# Altium schematic symbol library Centralize.SchLib: 1081 symbols (part 18 of 26)
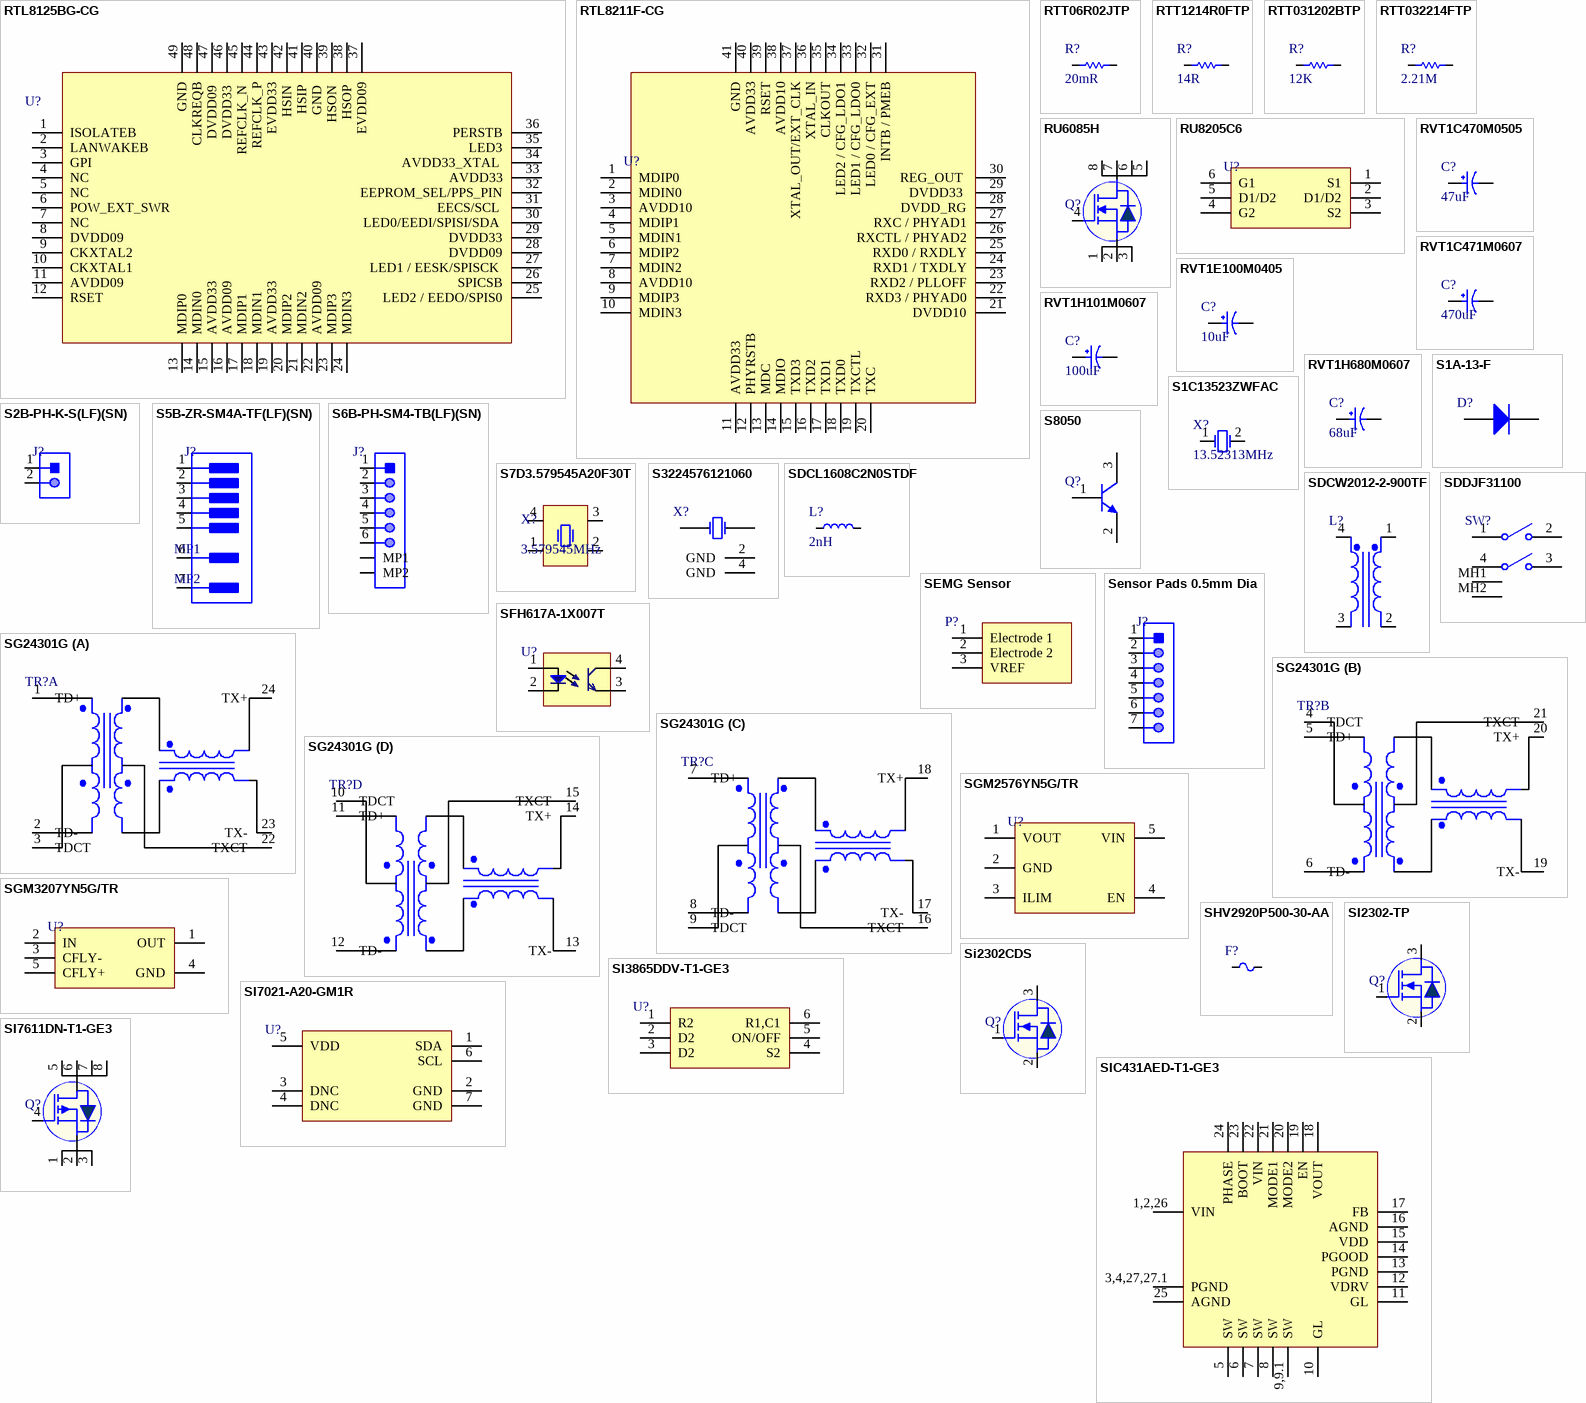
[diagram p64: symbols RTL8125BG-CG to SIC431AED-T1-GE3]

## S1C13523ZWFAC
designator X?, comment 13.52313MHz
13.52313MHz In-line passive crystal oscillator 20pF 60Ω ±20ppm ±30ppm -40℃~+85℃ HC-49S-2P Crystals ROHS; Manufacturer: JYJE; Manufacturer Part Number: S1C13523ZWFAC; Package: HC-49S-2P; LCSC Part Number: C2681243; ComponentLink1Description: LCSC; ComponentLink1URL: https://www.lcsc.com/product-detail/Crystals_JYJE-S1C13523ZWFAC_C2681243.html
footprint HC-49S-2P
pins: 1 OSC1, 2 OSC2

## S2B-PH-K-S(LF)(SN)
designator J?
Conn Shrouded Header (4 Sides) HDR 2 POS 2mm Solder RA Side Entry Thru-Hole Box; Manufacturer: JST; Manufacturer Part Number: S2B-PH-K-S(LF)(SN); Contact Resistance: 20mR; Max Current Rating: 2A; Voltage Rating: 100V; Number of Positions: 2; Gender: Male; Insulation Resistance: 1GR; Item Type: JST Connector; Supplier 1: Rs; RoHS: Yes; Category: Headers and Wire Housings; Stock 1: 39975; Pricing 1: 125=0.02920, 250=0.13800, 1250=0.12800, 5000=0.12200 (GBP); Mounting Technology: Through Hole; Pins: 2; Contact Material: Brass,Tin,Bronze; Contact Plating: Tin,Copper; Housing Color: White; Housing Material: Polyamide; Color: Natural,White; Min Operating Temperature: -25°C; Max Operating Temperature: 85°C; Number of Rows: 1; Current Rating: 2A; Packaging: Bulk; Termination: Solder; Fastening Type: Detent; Number of Contacts: 2; Max Voltage Rating (AC): 100V; Orientation: Right Angle; Series: PH; Contact Type: Male Pin; Number of Poles: 2; Voltage Rating (AC): 100V; Max Voltage Rating (DC): 100V; Working Voltage: 100V; Length: 5.9mm; Width: 4.5mm; Height: 9.4mm; Pitch: 2mm; Depth: 7.6mm; Lead Pitch: 2mm; Contact Mating Length: 0.13inch; Reach SVHC Compliant: No; Lead Free: Lead Free; Flammability Rating: UL94 V-0; ComponentLink1URL: https://datasheet.ciiva.com/11747/0900766b8082f558-11747128.pdf?src-supplier=Rs; ComponentLink1Description: https://datasheet.ciiva.com/11747/0900766b8082f558-11747128.pdf?src-supplier=Rs; ComponentLink2URL: https://datasheet.ciiva.com/712/eph-712447.pdf?src-supplier=Digi-Key; ComponentLink2Description: https://datasheet.ciiva.com/712/eph-712447.pdf?src-supplier=Digi-Key; ComponentLink3URL: https://datasheet.ciiva.com/16484/s2b-ph-k-slfsn-16484405.pdf?src-supplier=Future+Electronics; ComponentLink3Description: https://datasheet.ciiva.com/16484/s2b-ph-k-slfsn-16484405.pdf?src-supplier=Future+Electronics; ComponentLink4URL: https://datasheet.ciiva.com/26894/getdatasheetpartid-641020-26894599.pdf?src-supplier=Verical; ComponentLink4Description: https://datasheet.ciiva.com/26894/getdatasheetpartid-641020-26894599.pdf?src-supplier=Verical; ComponentLink5URL: https://datasheet.ciiva.com/8052/80564-8052207.pdf?src-supplier=Element14; ComponentLink5Description: https://datasheet.ciiva.com/8052/80564-8052207.pdf?src-supplier=Element14; Supplier Part Number 1: 8201494P; LCSC Part Number: C173752
footprint S2B-PH-K-S(LF)(SN)
pins: 1, 2

## S5B-ZR-SM4A-TF(LF)(SN)
designator J?
CONN HEADER SMD R/A 5POS 1.5MM; Manufacturer: JST; Manufacturer Part Number: S5B-ZR-SM4A-TF(LF)(SN); Contact Resistance: 30mR; Max Current Rating: 1A; Voltage Rating: 50V; Number of Positions: 5; Gender: Male; Item Type: Wire to Wire Connector; Supplier 1: Arrow Electronics; RoHS: Yes; Category: Headers and Wire Housings; Stock 1: 66000; Pricing 1: 1000=0.3882, 2000=0.3767, 3000=0.3536, 5000=0.3417, 10000=0.3075, 50000=0.3045 (USD); Mounting Technology: Surface Mount; Color: Natural; Contact Material: Brass,Tin; Contact Plating: Tin,Copper; Housing Color: Beige; Housing Material: Polyamide; Contact Shape: Circular; Contact Finish - Mating: TIN; Insulation Material: Nylon; Insulation Color: Natural; Min Operating Temperature: -25°C; Max Operating Temperature: 85°C; Number of Rows: 1; Packaging: Tape and Reel; Current Rating: 1A; Termination: Solder; Fastening Type: Detent; Max Voltage Rating (AC): 50V; Number of Contacts: 5; Orientation: Right Angle; Connector Type: Header; Series: ZH; Contact Type: Male Pin; Length: 10.5mm; Width: 3.5mm; Height: 7.2mm; Pitch: 1.5mm; Depth: 6.5mm; Lead Free: Lead Free; Flammability Rating: UL94 V-0; Reach SVHC Compliant: Unknown; ComponentLink1URL: https://datasheet.ciiva.com/26924/getdatasheetpartid-640788-26924051.pdf?src-supplier=Verical; ComponentLink1Description: https://datasheet.ciiva.com/26924/getdatasheetpartid-640788-26924051.pdf?src-supplier=Verical; ComponentLink2URL: https://datasheet.ciiva.com/712/ezh-712574.pdf?src-supplier=Digi-Key; ComponentLink2Description: https://datasheet.ciiva.com/712/ezh-712574.pdf?src-supplier=Digi-Key; ComponentLink3URL: https://datasheet.ciiva.com/712/ezh-712575.pdf?src-supplier=Digi-Key; ComponentLink3Description: https://datasheet.ciiva.com/712/ezh-712575.pdf?src-supplier=Digi-Key; ComponentLink4URL: https://datasheet.ciiva.com/712/ezh-712576.pdf?src-supplier=Digi-Key; ComponentLink4Description: https://datasheet.ciiva.com/712/ezh-712576.pdf?src-supplier=Digi-Key; ComponentLink5URL: https://datasheet.ciiva.com/16484/ezr-16484588.pdf?src-supplier=Future+Electronics; ComponentLink5Description: https://datasheet.ciiva.com/16484/ezr-16484588.pdf?src-supplier=Future+Electronics; ComponentLink6URL: https://datasheet.ciiva.com/46409/1718812-46409350.pdf?src-supplier=Element14; ComponentLink6Description: https://datasheet.ciiva.com/46409/1718812-46409350.pdf?src-supplier=Element14; ComponentLink7URL: https://datasheet.ciiva.com/46409/1718812-46409351.pdf?src-supplier=Element14; ComponentLink7Description: https://datasheet.ciiva.com/46409/1718812-46409351.pdf?src-supplier=Element14; Supplier Part Number 1: S5B-ZR-SM4A-TF(LF)(SN); LCSC Part Number: C485355
footprint S5B-ZR-SM4A-TF(LF)(SN)
pins: 1, 2, 3, 4, 5, 6 MP1, 7 MP2

## S6B-PH-SM4-TB(LF)(SN)
designator J?
CONN HEADER SMD R/A 6POS 2MM; Manufacturer: JST; Manufacturer Part Number: S6B-PH-SM4-TB(LF)(SN); Contact Resistance: 20mR; Max Current Rating: 2A; Number of Poles: 6; Voltage Rating (AC): 100V; Insulation Resistance: 1GR; Gender: Male; Item Type: JST Connector; Supplier 1: Rs; RoHS: Yes; Category: Connectors; Stock 1: 8280; Pricing 1: 125=0.16040, 500=0.65000, 2500=0.61200, 5000=0.58600 (GBP); Mounting Technology: Surface Mount; Contact Material: Copper Alloy,Tin,Bronze,Brass; Contact Plating: Tin,Copper; Color: White; Housing Color: Beige; Housing Material: Polyamide; Contact Shape: Square; Insulation Material: Nylon; Insulation Color: Natural; Contact Finish - Mating: TIN; Min Operating Temperature: -25°C; Max Operating Temperature: 85°C; Number of Rows: 1; Packaging: Tape and Reel; Current Rating: 2A; Voltage Rating: 100V; Number of Positions: 6; Termination: Solder; Fastening Type: Detent; Max Voltage Rating (AC): 100V; Number of Contacts: 6; Working Voltage: 100V; Max Voltage Rating (DC): 100V; Orientation: Right Angle; Connector Type: Header; Series: PH; Contact Type: Male Pin; Length: 15.9mm; Width: 5mm; Height: 9.4mm; Lead Pitch: 2mm; Pitch: 2mm; Contact Mating Length: 0.13inch; Depth: 7.6mm; Reach SVHC Compliant: Yes; Lead Free: Lead Free; Flammability Rating: UL94 V-0; ComponentLink1URL: https://datasheet.ciiva.com/11747/0900766b80df0d9d-11747278.pdf?src-supplier=Rs; ComponentLink1Description: https://datasheet.ciiva.com/11747/0900766b80df0d9d-11747278.pdf?src-supplier=Rs; ComponentLink2URL: https://datasheet.ciiva.com/8052/1699381-8052221.pdf?src-supplier=Element14; ComponentLink2Description: https://datasheet.ciiva.com/8052/1699381-8052221.pdf?src-supplier=Element14; ComponentLink3URL: https://datasheet.ciiva.com/712/eph-712622.pdf?src-supplier=Digi-Key; ComponentLink3Description: https://datasheet.ciiva.com/712/eph-712622.pdf?src-supplier=Digi-Key; ComponentLink4URL: https://datasheet.ciiva.com/712/eph-712623.pdf?src-supplier=Digi-Key; ComponentLink4Description: https://datasheet.ciiva.com/712/eph-712623.pdf?src-supplier=Digi-Key; ComponentLink5URL: https://datasheet.ciiva.com/730/eph-730589.pdf?src-supplier=Digi-Key; ComponentLink5Description: https://datasheet.ciiva.com/730/eph-730589.pdf?src-supplier=Digi-Key; ComponentLink6URL: https://datasheet.ciiva.com/16340/jsts6b-ph-sm4-tb-lf-sn-16340154.pdf?src-supplier=Future+Electronics; ComponentLink6Description: https://datasheet.ciiva.com/16340/jsts6b-ph-sm4-tb-lf-sn-16340154.pdf?src-supplier=Future+Electronics; Supplier Part Number 1: 6881369P; LCSC Part Number: C265405
footprint S6B-PH-SM4-TB(LF)(SN)
pins: 1, 2, 3, 4, 5, 6, MP1, MP2

## S7D3.579545A20F30T
designator X?, comment 3.579545MHz
5V~5V ±20ppm CMOS 3.579545MHz SMD7050-4P Oscillators ROHS; Manufacturer: Shenzhen SCTF Elec; Manufacturer Part Number: S7D3.579545A20F30T; Item Type: Crystal; Package: SMD7050-4P; LCSC Part Number: C386914; ComponentLink1Description: LCSC; ComponentLink1URL: https://www.lcsc.com/product-detail/Oscillators_Shenzhen-SCTF-Elec-S7D3-579545A20F30T_C386914.html
footprint SMD7050-4P
pins: 1 ENABLE CONTROL, 2 GND, 3 OUT PUT , 4 VDD

## S8050
designator Q?
Trans Gp Bjt NPN 25V 1.5A 300MW 3-PIN SOT-23 T/r; Manufacturer: Comchip; Manufacturer Part Number: SS8050-G; Collector Emitter Voltage (VCEO): 400mV; Transition Frequency: 100MHz; Supplier 1: Arrow Electronics; RoHS: Yes; Stock 1: 2514; Pricing 1: 1=0.26480, 10=0.19960, 25=0.19760, 50=0.19590, 100=0.09990, 250=0.09890, 500=0.07670, 1000=0.05180 (USD); Mount: Surface Mount; Case/Package: TO-236-3; Packaging: Tape and Reel; Max Power Dissipation: 300mW; Max Collector Current: 1.5A; Collector Emitter Breakdown Voltage: 25V; Max Breakdown Voltage: 25V; ComponentLink1URL: http://www.comchiptech.com/admin/files/product/SS8050-G RevA181526.pdf?src-supplier=Digi-Key; ComponentLink1Description: http://www.comchiptech.com/admin/files/product/SS8050-G RevA181526.pdf?src-supplier=Digi-Key; ComponentLink2URL: http://www.comchiptech.com/cms/UserFiles/SS8050-G%20RevA181526.pdf?src-supplier=Digi-Key; ComponentLink2Description: http://www.comchiptech.com/cms/UserFiles/SS8050-G%20RevA181526.pdf?src-supplier=Digi-Key; Supplier Part Number 1: SS8050-G; LCSC Part Number: C105433
footprint SOT-23 (TRANS NPN 40V 0.6A SOT23)
pins: 1 B, 2 E, 3 C

## S3224576121060
designator X?
24.576MHz SMD Crystal Resonator 12pF 60Ω ±10ppm -40℃~+85℃ SMD3225-4P Crystals ROHS; Manufacturer: JGHC; Manufacturer Part Number: S3224576121060; Footprint: Custom; ComponentLink1Description: LCSC; ComponentLink1URL: https://lcsc.com/product-detail/Crystals_JGHC-S3224576121060_C390772.html; Value: 24.576MHz; LCSC Part Number: C390772
footprint S3224576121060_ (24.576MHz SMD Crystal Resonator 12pF 60O ±10ppm -40?~+85? SMD3225-4P Crystals ROHS)
pins: 1 OSC1, 2 GND, 3 OSC2, 4 GND

## SDCL1608C2N0STDF
designator L?, comment 2nH
2nH ±0.3nH 0603 Inductors; Manufacturer: Sunlord; Manufacturer Part Number: SDCL1608C2N0STDF; Footprint: 0603; ComponentLink1Description: LCSC; ComponentLink1URL: https://lcsc.com/product-detail/Inductors-SMD_Sunlord-SDCL1608C2N0STDF_C370234.html; Value: 2nH; LCSC Part Number: C370234
footprint IND-0603 (1608 Metric) (0.063" L x 0.032" W (1.60mm x 0.80mm))
pins: 1, 2

## SDCW2012-2-900TF
designator L?
90Ω@100MHz -40℃~+85℃ 350mΩ 50V 2 330mA 125V 0805 Common Mode Filters ROHS; Manufacturer: Sunlord; Manufacturer Part Number: SDCW2012-2-900TF; Supplier 1: Digi-Key; RoHS: No; Category: Common Mode Chokes; Supplier Part Number 1: 3442-SDCW2012-2-900TFCT-ND; ComponentLink1Description: LCSC; ComponentLink1URL: https://www.lcsc.com/product-detail/Common-Mode-Filters_Sunlord-SDCW2012-2-900TF_C54888.html; LCSC Part Number: C54888
footprint SDCW2012-2-900TF_
pins: 1, 2, 3, 4

## SDDJF31100
designator SW?
Black Concave edge bending Double pole single throw O - Solder Lug(Straight foot) 16A 250V Plugin Rocker Switches ROHS; Manufacturer: ALPSALPINE; Manufacturer Part Number: SDDJF31100; Item Type: Switch; Package: Plugin; LCSC Part Number: C380204; ComponentLink1Description: LCSC; ComponentLink1URL: https://www.lcsc.com/product-detail/Rocker-Switches_ALPSALPINE-SDDJF31100_C380204.html
footprint SDDJF31100
pins: 1, 2, 3, 4, MH1, MH2

## SEMG Sensor
designator P?
Sensor Connecting Pads
footprint sEMG-sensor
pins: 1 Electrode 1, 2 Electrode 2, 3 VREF

## Sensor Pads 0.5mm Dia
designator J?
Wire Connecting Pad; Manufacturer Part Number: Sensor Pads; Item Type: SMD Pads
footprint Sensor-Pads 0.5mm Dia
pins: 1, 2, 3, 4, 5, 6, 7

## SFH617A-1X007T
designator U?
OPTOISOLATOR 5.3KV TRANS 4SMD; Manufacturer: Vishay Semiconductors; Manufacturer Part Number: SFH617A-1X007T; Max Power Dissipation: 150mW; Reverse Breakdown Voltage: 6V; Forward Voltage: 1.35V; Forward Current: 60mA; Number of Channels: 1; Collector Emitter Voltage (VCEO): 70V; Output Current per Channel: 50mA; Collector Emitter Saturation Voltage: 400mV; Max Collector Current: 100mA; Power Dissipation: 400mW; Current Transfer Ratio: 80%; Input Type: DC; Supplier 1: Digi-Key; RoHS: Yes; Category: Optocouplers; Stock 1: 899; Pricing 1: 1=1.12000, 10=0.73200, 100=0.47950 (USD); Mount: Surface Mount; Case/Package: SMD/SMT; Number of Pins: 4; Min Operating Temperature: -55°C; Max Operating Temperature: 110°C; Packaging: Tape and Reel; Package Quantity: 1000; Max Output Voltage: 70V; Max Input Current: 60mA; Number of Elements: 1; Collector-emitter Voltage-Max: 400mV; Radiation Hardening: No; RoHS Compliant: Yes; ComponentLink1URL: https://datasheet.ciiva.com/12239/sfh617a-12239406.pdf?src-supplier=Mouser; ComponentLink1Description: https://datasheet.ciiva.com/12239/sfh617a-12239406.pdf?src-supplier=Mouser; ComponentLink2URL: https://datasheet.ciiva.com/18616/options-18616574.pdf?src-supplier=Digi-Key; ComponentLink2Description: https://datasheet.ciiva.com/18616/options-18616574.pdf?src-supplier=Digi-Key; Supplier Part Number 1: 751-SFH617A-1X007TCT-ND; Item Type: OPTOISOLATOR
footprint 4-SMD  (SFH617A-1X007T)
pins: 1 An, 2 Ca, 3 E, 4 C

## SG24301G
designator TR?
SMD RJ45 Transformer ROHS; Manufacturer: JWD; Manufacturer Part Number: SG24301G; Package: SMD; ComponentLink1Description: LCSC; ComponentLink1URL: https://www.lcsc.com/product-detail/RJ45-Transformer_JWD-SG24301G_C722253.html; LCSC Part Number: C722253; Item Type: Transformer
footprint SG24301G
part A pins: 1 TD+, 2 TD-, 3 TDCT, 22 TXCT, 23 TX-, 24 TX+
part B pins: 4 TDCT, 5 TD+, 6 TD-, 19 TX-, 20 TX+, 21 TXCT
part C pins: 7 TD+, 8 TD-, 9 TDCT, 16 TXCT, 17 TX-, 18 TX+
part D pins: 10 TDCT, 11 TD+, 12 TD-, 13 TX-, 14 TX+, 15 TXCT

## SGM2576YN5G/TR
designator U?
SOT-23-5 Power Distribution Switches ROHS; Manufacturer: SGMICRO; Manufacturer Part Number: SGM2576YN5G/TR; Item Type: IC; ComponentLink1Description: LCSC; ComponentLink1URL: https://lcsc.com/product-detail/Power-Distribution-Switches_SGMICRO-SGM2576YN5G-TR_C699888.html; Package: SOT-23-5; LCSC Part Number: C699888
footprint SOT-23-5
pins: 1 VOUT, 2 GND, 3 ILIM, 4 EN, 5 VIN

## SGM3207YN5G/TR
designator U?
NO Charge pump 1 -5.5V~-1.4V 1.4V~5.5V 60mA 19kHz SOT-23-5 DC-DC Converters ROHS; Manufacturer: SG Micro; Manufacturer Part Number: SGM3207YN5G/TR; Item Type: IC; Supplier 1: Avnet; RoHS: No; Category: Uncategorized; Pricing 1: 3000=0.38750, 6000=0.36250, 12000=0.33750, 18000=0.32500, 24000=0.31250, 30000=0.31250, 300000=0.30500 (USD); LCSC Part Number: C80403; Supplier Part Number 1: SGM3207YN5G/TR
footprint SOT-23-5
pins: 1 OUT, 2 IN, 3 CFLY-, 4 GND, 5 CFLY+

## SHV2920P500-30-AA
designator F?
30V 5A 5A 2920 Resettable Fuses ROHS; Manufacturer: PTTC(Polytronics Tech); Manufacturer Part Number: SHV2920P500-30-AA; Item Type: Fuse; ComponentLink1Description: LCSC; ComponentLink1URL: https://www.lcsc.com/product-detail/Resettable-Fuses_PTTC-Polytronics-Tech-SHV2920P500-30-AA_C495350.html; Package: 2920; LCSC Part Number: C495350
footprint Fuse-2920
pins: 1, 2

## SI2302-TP
designator Q?
SI2302 Series 20 3 A N-Ch Enhancement Mode Field Effect Transistor - SOT-23-3; Manufacturer: MCC; Manufacturer Part Number: SI2302-TP; Rds On Max: 72mR; Input Capacitance: 237pF; Drain to Source Voltage (Vdss): 20V; Continuous Drain Current (ID): 3A; Max Power Dissipation: 1.25W; Drain to Source Resistance: 110mR; Number of Elements: 1; Gate to Source Voltage (Vgs): 8V; Polarity: N-CHANNEL; Supplier 1: Digi-Key; RoHS: Yes; Category: Transistors; Stock 1: 13753; Pricing 1: 1=0.50000, 10=0.40300, 100=0.27460, 500=0.20592, 1000=0.15444 (USD); Mount: Surface Mount; Case/Package: SOT-23; Number of Pins: 3; Min Operating Temperature: -55°C; Max Operating Temperature: 150°C; Packaging: Tape and Reel; Package Quantity: 3000; Drain to Source Breakdown Voltage: 20V; Power Dissipation: 1.25W; Lead Free: Lead Free; RoHS Compliant: Yes; ComponentLink1URL: https://datasheet.ciiva.com/935/si2302sot-23-935107.pdf?src-supplier=Digi-Key; ComponentLink1Description: https://datasheet.ciiva.com/935/si2302sot-23-935107.pdf?src-supplier=Digi-Key; ComponentLink2URL: https://datasheet.ciiva.com/935/si2302sot-23-935109.pdf?src-supplier=Digi-Key; ComponentLink2Description: https://datasheet.ciiva.com/935/si2302sot-23-935109.pdf?src-supplier=Digi-Key; ComponentLink3URL: https://datasheet.ciiva.com/935/si2302sot-23-935108.pdf?src-supplier=Digi-Key; ComponentLink3Description: https://datasheet.ciiva.com/935/si2302sot-23-935108.pdf?src-supplier=Digi-Key; Supplier Part Number 1: SI2302-TPMSCT-ND; LCSC Part Number: C77977
footprint SOT-23 (TRANS NPN 40V 0.6A SOT23)
pins: 1 G, 2 S, 3 D

## Si2302CDS
designator Q?
N-CHANNEL 20-V (D-S) MOSFET; Manufacturer: TECH PUBLIC; Manufacturer Part Number: SI2302CDS; ComponentLink1Description: LCSC; ComponentLink1URL: https://www.lcsc.com/product-detail/MOSFETs_TECH-PUBLIC-SI2302CDS_C5310968.html; Package: SOT-23; LCSC Part Number: C5310968; Item Type: Mosfet
footprint Sot-23 (TRANS NPN 40V 0.6A SOT23)
pins: 1 G, 2 S, 3 D

## SI3865DDV-T1-GE3
designator U?
IC PWR SWITCH P-CHAN 1:1 6TSOP; Manufacturer: Vishay; Manufacturer Part Number: SI3865DDV-T1-GE3; Output Current: 1A; Number of Outputs: 1; Max Power Dissipation: 830mW; Max Supply Voltage: 12V; Min Supply Voltage: 1.5V; Interface: On/Off; Max Output Current: 2.8A; On-State Resistance: 165mR; Output Configuration: High Side; On-state Resistance-Max: 54mR; Supplier 1: Digi-Key; Stock 1: 54870; Pricing 1: 1=0.58, 10=0.494, 25=0.462, 100=0.3432, 500=0.26796, 1000=0.2178 (USD); Mount: Surface Mount; Case/Package: TSOP; Number of Pins: 6; Weight: 0.000705oz; Min Operating Temperature: -55°C; Max Operating Temperature: 150°C; Packaging: Tape and Reel; Package Quantity: 3000; Power Dissipation: 830mW; Current Rating: 2.8A; Series: TrenchFET®; Rated Current-Max: 2.8A; Length: 3.1mm; Width: 1.7mm; Height: 1mm; Radiation Hardening: No; REACH SVHC: No SVHC; Lead Free: Lead Free; RoHS Compliant: Yes; ComponentLink1URL: http://www.mouser.com/ds/2/427/si3865ddv-256526.pdf?src-supplier=Mouser; ComponentLink1Description: http://www.mouser.com/ds/2/427/si3865ddv-256526.pdf?src-supplier=Mouser; ComponentLink2URL: http://www.vishay.com/docs/67998/si3865ddv.pdf?src-supplier=Avnet; ComponentLink2Description: http://www.vishay.com/docs/67998/si3865ddv.pdf?src-supplier=Avnet; ComponentLink3URL: https://www.verical.com/server-webapp/html/getDatasheet?partID=710254&src-supplier=Verical; ComponentLink3Description: https://www.verical.com/server-webapp/html/getDatasheet?partID=710254&src-supplier=Verical; ComponentLink4URL: https://media.digikey.com/pdf/Data%20Sheets/Vishay%20Siliconix%20PDFs/Si3865DDV.pdf?src-supplier=Digi-Key; ComponentLink4Description: https://media.digikey.com/pdf/Data%20Sheets/Vishay%20Siliconix%20PDFs/Si3865DDV.pdf?src-supplier=Digi-Key; Supplier Part Number 1: SI3865DDV-T1-GE3CT-ND; LCSC Part Number: C141534; Item Type: IC
footprint 6-TSOP_
pins: 1 R2, 2 D2, 3 D2, 4 S2, 5 ON/OFF, 6 R1,C1

## SI7021-A20-GM1R
designator U?
SENS HUMID/TEMP 3.6V I2C 2% 6DFN; Manufacturer: Silicon Labs; Manufacturer Part Number: SI7021-A20-GM1R; Response Time: 18s; Accuracy: 3%; Sensor Type: Temperature; Output Type: I2C,Digital; Supplier 1: Digi-Key; Stock 1: 8770; Pricing 1: 1=3.37, 25=3.2436, 100=3.2313 (USD); Mount: Surface Mount; Min Operating Temperature: -40°C; Max Operating Temperature: 85°C; ComponentLink1URL: https://www.silabs.com/Support%20Documents/TechnicalDocs/Si7021-A20.pdf?src-supplier=Avnet; ComponentLink1Description: https://www.silabs.com/Support%20Documents/TechnicalDocs/Si7021-A20.pdf?src-supplier=Avnet; ComponentLink2URL: https://www.silabs.com/documents/public/data-sheets/Si7021-A20.pdf?src-supplier=Newark; ComponentLink2Description: https://www.silabs.com/documents/public/data-sheets/Si7021-A20.pdf?src-supplier=Newark; ComponentLink3URL: https://www.silabs.com/Support%20Documents%2fTechnicalDocs%2fSi7021-A20.pdf?src-supplier=Digi-Key; ComponentLink3Description: https://www.silabs.com/Support%20Documents%2fTechnicalDocs%2fSi7021-A20.pdf?src-supplier=Digi-Key; ComponentLink4URL: https://www.silabs.com/Support%20Documents/TechnicalDocs/Si7021-A20.pdf?src-supplier=Avnet+Asia; ComponentLink4Description: https://www.silabs.com/Support%20Documents/TechnicalDocs/Si7021-A20.pdf?src-supplier=Avnet+Asia; ComponentLink5URL: https://www.silabs.com/documents/public/data-sheets/Si7021-A20.pdf?src-supplier=Digi-Key; ComponentLink5Description: https://www.silabs.com/documents/public/data-sheets/Si7021-A20.pdf?src-supplier=Digi-Key; ComponentLink6URL: https://www.silabs.com/documents/public/data-sheets/Si7021-A20.pdf?src-supplier=Farnell; ComponentLink6Description: https://www.silabs.com/documents/public/data-sheets/Si7021-A20.pdf?src-supplier=Farnell; Supplier Part Number 1: 336-4380-1-ND; LCSC Part Number: C132603
footprint 6-DFN (3x3)
pins: 1 SDA, 2 GND, 3 DNC, 4 DNC, 5 VDD, 6 SCL, 7 GND

## SI7611DN-T1-GE3
designator Q?
MOSFET P-CH 40V 18A PPAK1212-8; Manufacturer: Vishay Siliconix; Manufacturer Part Number: SI7611DN-T1-GE3; Rds On Max: 25mR; Input Capacitance: 1.98nF; Nominal Vgs: -3V; Rise Time: 11ns; Drain to Source Voltage (Vdss): -40V; Continuous Drain Current (ID): 9.3A; Max Power Dissipation: 39W; Gate to Source Voltage (Vgs): 20V; Fall Time: 9ns; Turn-Off Delay Time: 30ns; Number of Elements: 1; Power Dissipation: 3.7W; Turn-On Delay Time: 10ns; Polarity: P-CHANNEL; Supplier 1: Avnet; RoHS: Yes; Category: MOSFETs; Pricing 1: 3000=0.96116 (USD); Mount: Surface Mount; Number of Pins: 8; Min Operating Temperature: -50°C; Max Operating Temperature: 150°C; Package Quantity: 3000; Packaging: Tape and Reel; Drain to Source Resistance: 25mR; Threshold Voltage: -3V; Drain to Source Breakdown Voltage: -40V; Number of Channels: 1; On-State Resistance: 25mR; Series: TrenchFET®; Drain-source On Resistance-Max: 25mR; Length: 3.05mm; Width: 3.05mm; Height: 1.04mm; Radiation Hardening: No; Lead Free: Lead Free; RoHS Compliant: Yes; ComponentLink1URL: https://datasheet.ciiva.com/16217/si7611dn-16217425.pdf?src-supplier=Future+Electronics; ComponentLink1Description: https://datasheet.ciiva.com/16217/si7611dn-16217425.pdf?src-supplier=Future+Electronics; ComponentLink2URL: https://datasheet.ciiva.com/22652/1719651-22652413.pdf?src-supplier=Element14; ComponentLink2Description: https://datasheet.ciiva.com/22652/1719651-22652413.pdf?src-supplier=Element14; ComponentLink3URL: https://datasheet.ciiva.com/4441/si7611dn-244617-4441134.pdf?src-supplier=Mouser; ComponentLink3Description: https://datasheet.ciiva.com/4441/si7611dn-244617-4441134.pdf?src-supplier=Mouser; ComponentLink4URL: https://datasheet.ciiva.com/933/si7611dn-933572.pdf?src-supplier=Digi-Key; ComponentLink4Description: https://datasheet.ciiva.com/933/si7611dn-933572.pdf?src-supplier=Digi-Key; ComponentLink5URL: https://datasheet.ciiva.com/933/si7611dn-933573.pdf?src-supplier=Digi-Key; ComponentLink5Description: https://datasheet.ciiva.com/933/si7611dn-933573.pdf?src-supplier=Digi-Key; ComponentLink6URL: https://datasheet.ciiva.com/933/si7611dn-933574.pdf?src-supplier=Digi-Key; ComponentLink6Description: https://datasheet.ciiva.com/933/si7611dn-933574.pdf?src-supplier=Digi-Key; ComponentLink7URL: https://datasheet.ciiva.com/11159/si7611dn-11159816.pdf?src-supplier=Avnet; ComponentLink7Description: https://datasheet.ciiva.com/11159/si7611dn-11159816.pdf?src-supplier=Avnet; ComponentLink8URL: https://datasheet.ciiva.com/22671/si7611dn-22671641.pdf?src-supplier=Element14; ComponentLink8Description: https://datasheet.ciiva.com/22671/si7611dn-22671641.pdf?src-supplier=Element14; Supplier Part Number 1: SI7611DN-T1-GE3; LCSC Part Number: C506599; Item Type: Mosfet
footprint PowerPAK® 1212-8
pins: 1 S, 2 S, 3 S, 4 G, 5 D, 6 D, 7 D, 8 D

## SIC431AED-T1-GE3
designator ?
Conv DC-DC 4.5V to 24V Synchronous Step Down Single-Out 0.6V 24A 24-Pin PowerPAK MLP EP T/R; Manufacturer: Vishay; Manufacturer Part Number: SIC431AED-T1-GE3; Output Type: Adjustable; Output Configuration: Positive; Number of Outputs: 1; Min Input Voltage: 3V; Min Output Voltage: 600mV; Max Output Voltage: 20V; Switching Frequency: 1MHz; Synchronous Rectifier: Yes; Item Type: Converter; Supplier 1: Mouser; RoHS: No; Category: Voltage Regulators - Switching; Stock 1: 56372; Pricing 1: 1=3.29000, 10=2.96000, 50=2.75000, 100=2.43000, 1000=1.99000, 10000=1.99000 (USD); Mount: Surface Mount; Number of Pins: 24; Min Operating Temperature: -40°C; Max Operating Temperature: 125°C; Packaging: Cut Tape; Max Input Voltage: 24V; Output Current: 24A; RoHS Compliant: No; ComponentLink1URL: http://www.farnell.com/datasheets/2687455.pdf?src-supplier=Farnell; ComponentLink1Description: http://www.farnell.com/datasheets/2687455.pdf?src-supplier=Farnell; ComponentLink2URL: http://www.vishay.com/docs/74589/sic431.pdf?src-supplier=Digi-Key; ComponentLink2Description: http://www.vishay.com/docs/74589/sic431.pdf?src-supplier=Digi-Key; ComponentLink3URL: http://www.vishay.com/docs/48283/_ms7327_1709.pdf?src-supplier=Digi-Key; ComponentLink3Description: http://www.vishay.com/docs/48283/_ms7327_1709.pdf?src-supplier=Digi-Key; ComponentLink4URL: http://www.farnell.com/datasheets/2687455.pdf?src-supplier=Newark; ComponentLink4Description: http://www.farnell.com/datasheets/2687455.pdf?src-supplier=Newark; ComponentLink5URL: http://www.farnell.com/datasheets/2687455.pdf?src-supplier=Element14; ComponentLink5Description: http://www.farnell.com/datasheets/2687455.pdf?src-supplier=Element14; ComponentLink6Description: LCSC; ComponentLink6URL: https://www.lcsc.com/product-detail/DC-DC-Converters_Vishay-Intertech-SIC431AED-T1-GE3_C2071422.html; LCSC Part Number: C2071422
footprint MLP44-24L(4x4)_
pins: 1,2,26 VIN, 3,4,27,27.1 PGND, 5 SW, 6 SW, 7 SW, 8 SW, 9,9.1 SW, 10 GL, 11 GL, 12 VDRV, 13 PGND, 14 PGOOD, 15 VDD, 16 AGND, 17 FB, 18 VOUT, 19 EN, 20 MODE2, 21 MODE1, 22 VIN, 23 BOOT, 24 PHASE, 25 AGND

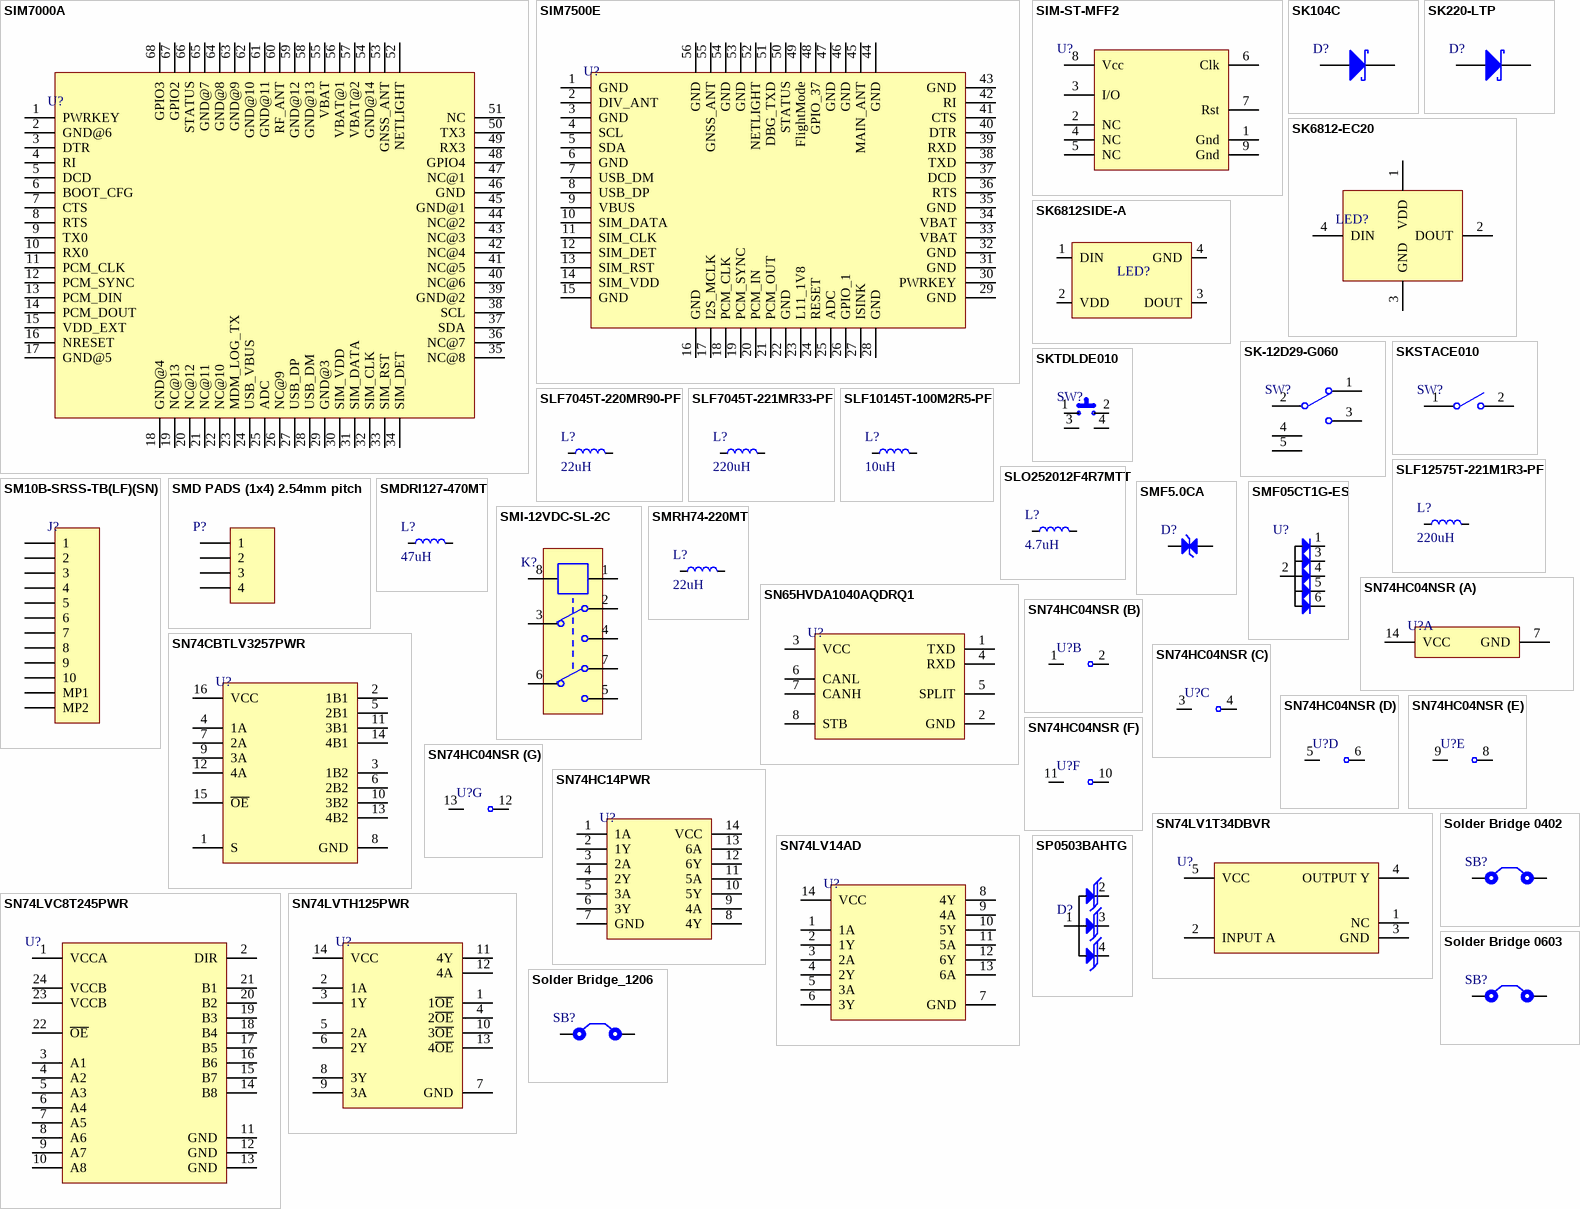
[diagram p37: symbols SIM7000A to SP0503BAHTG]

## SIM7000A
designator U?
eMTC CAT-M1 Module 700MHz/1700MHz/1900MHz 3.8V LCC; Manufacturer: Simcom; Manufacturer Part Number: SIM7000A; Supplier 1: Avnet; RoHS: No; Category: Uncategorized; Pricing 1: 50=18.60000, 100=17.40000, 200=16.20000, 300=15.60000, 400=15.00000, 500=15.00000, 5000=14.64000 (USD); Supplier Part Number 1: SIM7000A; ComponentLink1Description: LCSC; ComponentLink1URL: https://www.lcsc.com/product-detail/2G-3G-4G-5G-Modules_SIMCom-Wireless-Solutions-SIM7000A_C126271.html; LCSC Part Number: C126271; Item Type: Module
footprint SIM7000A
pins: 1 PWRKEY, 2 GND@6, 3 DTR, 4 RI, 5 DCD, 6 BOOT_CFG, 7 CTS, 8 RTS, 9 TX0, 10 RX0, 11 PCM_CLK, 12 PCM_SYNC, 13 PCM_DIN, 14 PCM_DOUT, 15 VDD_EXT, 16 NRESET, 17 GND@5, 18 GND@4, 19 NC@13, 20 NC@12, 21 NC@11, 22 NC@10, 23 MDM_LOG_TX, 24 USB_VBUS, 25 ADC, 26 NC@9, 27 USB_DP, 28 USB_DM, 29 GND@3, 30 SIM_VDD, 31 SIM_DATA, 32 SIM_CLK, 33 SIM_RST, 34 SIM_DET, 35 NC@8, 36 NC@7, 37 SDA, 38 SCL, 39 GND@2, 40 NC@6, 41 NC@5, 42 NC@4, 43 NC@3, 44 NC@2, 45 GND@1, 46 GND, 47 NC@1, 48 GPIO4, 49 RX3, 50 TX3, 51 NC, 52 NETLIGHT, 53 GNSS_ANT, 54 GND@14, 55 VBAT, 56 VBAT@1, 57 VBAT@2, 58 GND@13, 59 GND@12, 60 RF_ANT, 61 GND@11, 62 GND@10, 63 GND@9, 64 GND@8, 65 GND@7, 66 STATUS, 67 GPIO2, 68 GPIO3

## SIM7500E
designator U?
SMD,30x30mm 2G/3G/4G/5G Modules ROHS; Manufacturer: SIMCom; Manufacturer Part Number: SIM7500E; Item Type: IC; Package: SMD,30x30mm; LCSC Part Number: C126259; ComponentLink1Description: LCSC; ComponentLink1URL: https://www.lcsc.com/product-detail/2G-3G-4G-5G-Modules_SIMCom-Wireless-Solutions-SIM7500E_C126259.html
footprint SIM7500E
pins: 1 GND, 2 DIV_ANT, 3 GND, 4 SCL, 5 SDA, 6 GND, 7 USB_DM, 8 USB_DP, 9 VBUS, 10 SIM_DATA, 11 SIM_CLK, 12 SIM_DET, 13 SIM_RST, 14 SIM_VDD, 15 GND, 16 GND, 17 I2S_MCLK, 18 PCM_CLK, 19 PCM_SYNC, 20 PCM_IN, 21 PCM_OUT, 22 GND, 23 L11_1V8, 24 RESET, 25 ADC, 26 GPIO_1, 27 ISINK, 28 GND, 29 GND, 30 PWRKEY, 31 GND, 32 GND, 33 VBAT, 34 VBAT, 35 GND, 36 RTS, 37 DCD, 38 TXD, 39 RXD, 40 DTR, 41 CTS, 42 RI, 43 GND, 44 GND, 45 MAIN_ANT, 46 GND, 47 GND, 48 GPIO_37, 49 FlightMode, 50 STATUS, 51 DBG_TXD, 52 NETLIGHT, 53 GND, 54 GND, 55 GNSS_ANT, 56 GND

## SIM-ST-MFF2
designator U?
GLOBAL IOT EMBEDDED SIM CHIP; Manufacturer: Hologram; Manufacturer Part Number: SIM-ST-MFF2; Item Type: IC; Supplier 1: Digi-Key; Stock 1: 0; Pricing 1: 1=6.3, 100=5.985 (USD); ComponentLink1URL: https://media.digikey.com/pdf/Data%20Sheets/Hologram%20PDFs/SIM_DS_170107_v2.pdf?src-supplier=Digi-Key; ComponentLink1Description: https://media.digikey.com/pdf/Data%20Sheets/Hologram%20PDFs/SIM_DS_170107_v2.pdf?src-supplier=Digi-Key; Supplier Part Number 1: 1887-1002-1-ND
footprint QNF8 (6 x 5mm)
pins: 1 Gnd, 2 NC, 3 I/O, 4 NC, 5 NC, 6 Clk, 7 Rst, 8 Vcc, 9 Gnd

## SK104C
designator D?
40V 650mV@10A 10A SMC(DO-214AB) Schottky Barrier Diodes (SBD) ROHS; Manufacturer: MDD; Manufacturer Part Number: SK104C; Item Type: Diode; Package: SMC(DO-214AB); LCSC Part Number: C59500; ComponentLink1Description: LCSC; ComponentLink1URL: https://www.lcsc.com/product-detail/Schottky-Barrier-Diodes-SBD_MDD-Microdiode-Electronics-SK104C_C59500.html
footprint SMC
pins: 1, 2

## SK220-LTP
designator D?
200V 900mV@2A 2A SMB(DO-214AA) Schottky Barrier Diodes (SBD) ROHS; Manufacturer: MCC; Manufacturer Part Number: SK220-LTP; Item Type: Diode; Supplier 1: Mouser; RoHS: Yes; Category: Rectifier Diodes; Stock 1: 5871; Pricing 1: 1=0.47, 10=0.364, 50=0.364, 100=0.227, 1000=0.12, 10000=0.092 (USD); Mounting Technology: Surface Mount; Package Quantity: 3000; Packaging: Tape and Reel; Average Rectified Current: 2A; Max Reverse Voltage (DC): 200V; Series: -; Lead Free: Lead Free; RoHS Compliant: Yes; ComponentLink1URL: https://datasheet.ciiva.com/6377/sk22-lsk220-ldo-214aa-6377942.pdf?src-supplier=Digi-Key; ComponentLink1Description: https://datasheet.ciiva.com/6377/sk22-lsk220-ldo-214aa-6377942.pdf?src-supplier=Digi-Key; Supplier Part Number 1: 833-SK220-LTP; LCSC Part Number: C725397
footprint SMB_
pins: 1, 2

## SK6812-EC20
designator LED?
5mA -40℃~+80℃ RGB SMD,2x2mm Light Emitting Diodes (LED) ROHS; Manufacturer: OPSCO Optoelectronics; Manufacturer Part Number: SK6812-EC20; Item Type: RGB LED; Package: SMD,2x2mm; LCSC Part Number: C2909058; ComponentLink1Description: LCSC; ComponentLink1URL: https://www.lcsc.com/product-detail/Light-Emitting-Diodes-LED_OPSCO-Optoelectronics-SK6812-EC20_C2909058.html
footprint SK6812-EC20
pins: 1 VDD, 2 DOUT, 3 GND, 4 DIN

## SK6812SIDE-A
designator LED?
SMD-4P,1.6x4mm Light Emitting Diodes (LED) ROHS; Manufacturer: OPSCO Optoelectronics; Manufacturer Part Number: SK6812SIDE-A; Item type: Addressable RGB LED; ComponentLink1Description: LCSC; ComponentLink1URL: https://www.lcsc.com/product-detail/Light-Emitting-Diodes-LED_OPSCO-Optoelectronics-SK6812SIDE-A_C5378721.html; Package: SMD-4P,1.6x4mm; LCSC Part Number: C5378721
footprint SK6812SIDE-A (SMD-4P,1.6x4mm Light Emitting Diodes (LED) ROHS)
pins: 1 DIN, 2 VDD, 3 DOUT, 4 GND

## SK-12D29-G060
designator SW?
Lying 1A SPDT 9.6mm 8.6mm 24V 3.6mm Black PCPin 10000 Rectangular columnar -25℃~+70℃ Plugin Slide Switches ROHS; Manufacturer: G-Switch; Manufacturer Part Number: SK-12D29-G060; Package: Custom; LCSC Part Number: C2848877; Item Type: Slide Switch; ComponentLink1Description: LCSC; ComponentLink1URL: https://www.lcsc.com/product-detail/Slide-Switches_G-Switch-SK-12D29-G060_C2848877.html
footprint SK-12D29-G060
pins: 1, 2, 3, 4, 5

## SKSTACE010
designator SW?
Tactile Switches SMT Top Push 0.9mm 7N Trav 100m Yellow; Manufacturer: Alps Electric; Manufacturer Part Number: SKSTACE010; Supplier 1: Mouser; RoHS: Yes; Category: Tactile Switches; Stock 1: 1089; Pricing 1: 1=1.08000, 10=1.08000, 50=0.90100, 100=0.81900, 1000=0.76700, 10000=0.74100 (USD); RoHS Compliant: Yes; Supplier Part Number 1: 688-SKSTACE010; LCSC Part Number: C341731
footprint SKSTACE010_
pins: 1, 2

## SKTDLDE010
designator SW?
50mA Lying SPST 12V Plugin Tactile Switches ROHS; Manufacturer: ALPSALPINE; Manufacturer Part Number: SKTDLDE010; Package: Plugin; LCSC Part Number: C115365; Item Type: Tactile Switch; ComponentLink1Description: LCSC; ComponentLink1URL: https://www.lcsc.com/product-detail/Tactile-Switches_ALPSALPINE-SKTDLDE010_C115365.html
footprint SKTDLDE010
pins: 1, 2, 3, 4

## SLF7045T-220MR90-PF
designator L?, comment 22uH
FIXED IND 22UH 1.34A 73.2MOHM SM; Manufacturer: TDK; Manufacturer Part Number: SLF7045T-220MR90-PF; Core Material: Ferrite; Tolerance: 20%; Saturation Current: 900mA; Shielding: Shielded; DC Resistance (DCR): 61mR; Test Frequency: 100kHz; Item Type: Inductor; Supplier 1: RSComponents; RoHS: Yes; Category: Fixed Inductors; Stock 1: 650; Pricing 1: 10=0.64900, 100=0.61900, 500=0.49700, 1000=0.34500, 2500=0.32500 (GBP); Mount: Surface Mount; Case/Package: Nonstandard; Min Operating Temperature: -40°C; Max Operating Temperature: 85°C; Packaging: Tape and Reel; Inductance Tolerance: 20%; Package Quantity: 1; Current Rating: 1.34A; Resistor Type: Wirewound; Inductance: 22uH; Max DC Current: 900mA; Termination: SMD/SMT; RMS Current (Irms): 1.34A; DC Current: 1.34A; Series: SLF; Rated Current-Max: 900mA; Length: 0.276inch; Width: 0.276inch; Height: 4.5mm; Height - Seated (Max): 0.189inch; Depth: 7.2mm; Radiation Hardening: No; Reach SVHC Compliant: Yes; Military Standard: Not; Lead Free: Lead Free; RoHS Compliant: Yes; ComponentLink1URL: https://datasheet.ciiva.com/3866/84print-detail-pdf-phplangenpart-noslf7045t-220mr90-pfnreimp-unit-x-3866590.pdf?src-supplier=Arrow+Electronics; ComponentLink1Description: https://datasheet.ciiva.com/3866/84print-detail-pdf-phplangenpart-noslf7045t-220mr90-pfnreimp-unit-x-3866590.pdf?src-supplier=Arrow+Electronics; LCSC Part Number: C13754; Supplier Part Number 1: 9164248
footprint SLF7045T- 220MR90-PF
pins: 1, 2

## SLF7045T-221MR33-PF
designator L?, comment 220uH
330mA 220uH ±20% 330mA SMD Power Inductors ROHS; Manufacturer: TDK; Manufacturer Part Number: SLF7045T-221MR33-PF; Supplier: Rs; Supplier Part Number: 7413021P; RoHS: Yes; Category: Fixed Inductors; Stock: 2580; Pricing: 50=0.544, 250=0.517, 500=0.438 (GBP); ComponentLink1URL: https://datasheet.ciiva.com/11798/0900766b812b7d4f-11798998.pdf?src-supplier=Rs; ComponentLink1Description: https://datasheet.ciiva.com/11798/0900766b812b7d4f-11798998.pdf?src-supplier=Rs; ComponentLink2URL: https://datasheet.ciiva.com/3866/print-detail-pdf-phplangenpart-noslf7045t-221mr33-pfnreimp-unit-x-3866593.pdf?src-supplier=Arrow+Electronics; ComponentLink2Description: https://datasheet.ciiva.com/3866/print-detail-pdf-phplangenpart-noslf7045t-221mr33-pfnreimp-unit-x-3866593.pdf?src-supplier=Arrow+Electronics; ComponentLink3URL: https://datasheet.ciiva.com/8045/1838969-8045733.pdf?src-supplier=Element14; ComponentLink3Description: https://datasheet.ciiva.com/8045/1838969-8045733.pdf?src-supplier=Element14; ComponentLink4URL: https://datasheet.ciiva.com/15992/e531-slf7045-15992151.pdf?src-supplier=Onlinecomponents.com; ComponentLink4Description: https://datasheet.ciiva.com/15992/e531-slf7045-15992151.pdf?src-supplier=Onlinecomponents.com; ComponentLink5URL: https://datasheet.ciiva.com/30208/print-detail-pdf-phplangenpart-noslf7045t-221mr33-pfnreimp-unit-x-30208282.pdf?src-supplier=Onlinecomponents.com; ComponentLink5Description: https://datasheet.ciiva.com/30208/print-detail-pdf-phplangenpart-noslf7045t-221mr33-pfnreimp-unit-x-30208282.pdf?src-supplier=Onlinecomponents.com
pins: 1, 2

## SLF10145T-100M2R5-PF
designator L?, comment 10uH
FIXED IND 10UH 2.5A 43.7 MOHM; Manufacturer: TDK; Manufacturer Part Number: SLF10145T-100M2R5-PF; Core Material: Ferrite; Tolerance: 20%; Saturation Current: 3A; Shielding: Shielded; DC Resistance (DCR): 36.4mR; Test Frequency: 1kHz; Supplier 1: Digi-Key; Stock 1: 3269; Pricing 1: 1=1.05, 10=0.975, 25=0.9, 50=0.75, 100=0.705, 250=0.63 (USD); Mount: Surface Mount; Case/Package: Nonstandard; Number of Pins: 2; Min Operating Temperature: -40°C; Max Operating Temperature: 105°C; Inductance: 10uH; Max DC Current: 2.5A; Package Quantity: 500; Current Rating: 2.5A; Packaging: Tape and Reel; Inductance Tolerance: 20%; Resistor Type: Wirewound; Termination: SMD/SMT; DC Current: 2.5A; RMS Current (Irms): 3A; Series: SLF; Rated Current-Max: 3A; Length: 10.1mm; Width: 0.398inch; Height: 4.5mm; Height - Seated (Max): 0.189inch; Depth: 10.4mm; Radiation Hardening: No; REACH SVHC: No SVHC; Military Standard: Not; Lead Free: Lead Free; RoHS Compliant: Yes; ComponentLink1URL: http://www.farnell.com/datasheets/1838969.pdf?src-supplier=Element14; ComponentLink1Description: http://www.farnell.com/datasheets/1838969.pdf?src-supplier=Element14; ComponentLink2URL: http://uk.rs-online.com/webdocs/14e9/0900766b814e91a9.pdf?src-supplier=RSComponents; ComponentLink2Description: http://uk.rs-online.com/webdocs/14e9/0900766b814e91a9.pdf?src-supplier=RSComponents; ComponentLink3URL: http://components.arrow.com/part/dataview/42010891S8914805N1165?src-supplier=Arrow+Electronics; ComponentLink3Description: http://components.arrow.com/part/dataview/42010891S8914805N1165?src-supplier=Arrow+Electronics; ComponentLink4URL: http://datasheet.iiic.cc/tdk/SLF10145T-100M2R5-PF.pdf?src-supplier=IIIC; ComponentLink4Description: http://datasheet.iiic.cc/tdk/SLF10145T-100M2R5-PF.pdf?src-supplier=IIIC; Supplier Part Number 1: 445-1975-6-ND; LCSC Part Number: C96116
footprint SLF10145T-100M2R5-PF_
pins: 1, 2

## SLF12575T-221M1R3-PF
designator L?, comment 220uH
Inductor Power Shielded Wirewound 220uH 20% 1KHz Ferrite 1.3A 310mOhm DCR Blister; Manufacturer: TDK; Manufacturer Part Number: SLF12575T-221M1R3-PF; DC Resistance (DCR): 310mR; Supplier 1: Digi-Key; RoHS: Yes; Category: Fixed Inductors; Stock 1: 1079; Pricing 1: 1=1.97000, 10=1.81500, 25=1.66360, 50=1.42180, 100=1.27050, 250=1.08900 (USD); Mount: Surface Mount; Case/Package: Nonstandard; Core Material: Ferrite; Min Operating Temperature: -20°C; Max Operating Temperature: 105°C; Package Quantity: 500; Packaging: Tape and Reel; Tolerance: 20%; Shielding: Shielded; Inductance: 220uH; Current Rating: 1.3A; Saturation Current: 1.3A; Max DC Current: 1.3A; Termination: SMD/SMT; Resistor Type: Wirewound; Test Frequency: 1kHz; DC Current: 1.3A; Series: SLF; Length: 12.5mm; Width: 12.5mm; Height: 0.295inch; Height - Seated (Max): 0.309inch; Depth: 12.8mm; Military Standard: Not; Lead Free: Lead Free; RoHS Compliant: Yes; ComponentLink1URL: https://datasheet.ciiva.com/11802/0900766b812b7d4f-11802208.pdf?src-supplier=RSComponents; ComponentLink1Description: https://datasheet.ciiva.com/11802/0900766b812b7d4f-11802208.pdf?src-supplier=RSComponents; Supplier Part Number 1: 445-174412-1-ND; LCSC Part Number: C93225; Item Type: Inductor
footprint SLF12575T-221M1R3-PF
pins: 1, 2

## SLO252012F4R7MTT
designator L?, comment 4.7uH
1.55A 4.7uH ±20% SMD Power Inductors ROHS; Manufacturer: Sunltech Tech; Manufacturer Part Number: SLO252012F4R7MTT; Package: SMD; LCSC Part Number: C275675; Item Type: Inductor; ComponentLink1Description: LCSC; ComponentLink1URL: https://www.lcsc.com/product-detail/Power-Inductors_Sunltech-Tech-SLO252012F4R7MTT_C275675.html
footprint SLO252012F4R7MTT
pins: 1, 2

## SM10B-SRSS-TB(LF)(SN)
designator J?
CONN HEADER SMD R/A 10POS 1MM; Manufacturer: JST; Manufacturer Part Number: SM10B-SRSS-TB(LF)(SN); Contact Resistance: 40mR; Current Rating: 1A; Voltage Rating (AC): 50V; Gender: Male; Number of Positions: 10; Insulation Resistance: 100MR; Item Type: JST Connector; Supplier 1: Future Electronics; RoHS: Yes; Category: Connectors; Pricing 1: 3000=0.64500 (USD); Mount: Surface Mount; Contact Plating: Tin,Lead,Copper; Contact Material: Copper Alloy; Color: Natural; Material: Polyamide; Housing Color: Beige; Housing Material: Polyamide; Contact Shape: Square; Contact Finish - Mating: TIN; Insulation Material: Nylon; Insulation Color: Natural; Min Operating Temperature: -25°C; Max Operating Temperature: 85°C; Number of Rows: 1; Packaging: Tape and Reel; Max Current Rating: 1A; Voltage Rating: 50V; Termination: Solder; Max Voltage Rating (AC): 50V; Number of Contacts: 10; Orientation: Right Angle; Connector Type: Header; Series: SR; Contact Type: Male Pin; Fastening Type: Pull; Length: 12mm; Lead Pitch: 1mm; Pitch: 1mm; Depth: 4.95mm; Reach SVHC Compliant: Yes; Lead Free: Lead Free; Flammability Rating: UL94 V-0; ComponentLink1URL: https://datasheet.ciiva.com/26894/getdatasheetpartid-708886-26894682.pdf?src-supplier=Verical; ComponentLink1Description: https://datasheet.ciiva.com/26894/getdatasheetpartid-708886-26894682.pdf?src-supplier=Verical; ComponentLink2URL: https://datasheet.ciiva.com/16221/sm10b-srss-tblfsn-16221242.pdf?src-supplier=Future+Electronics; ComponentLink2Description: https://datasheet.ciiva.com/16221/sm10b-srss-tblfsn-16221242.pdf?src-supplier=Future+Electronics; ComponentLink3URL: https://datasheet.ciiva.com/11752/0900766b8082f550-11752172.pdf?src-supplier=RSComponents; ComponentLink3Description: https://datasheet.ciiva.com/11752/0900766b8082f550-11752172.pdf?src-supplier=RSComponents; ComponentLink4URL: https://datasheet.ciiva.com/712/esr-712644.pdf?src-supplier=Digi-Key; ComponentLink4Description: https://datasheet.ciiva.com/712/esr-712644.pdf?src-supplier=Digi-Key; ComponentLink5URL: https://datasheet.ciiva.com/712/esr-712645.pdf?src-supplier=Digi-Key; ComponentLink5Description: https://datasheet.ciiva.com/712/esr-712645.pdf?src-supplier=Digi-Key; ComponentLink6URL: https://datasheet.ciiva.com/730/esr-730692.pdf?src-supplier=Digi-Key; ComponentLink6Description: https://datasheet.ciiva.com/730/esr-730692.pdf?src-supplier=Digi-Key; Supplier Part Number 1: 1165778; LCSC Part Number: C160409
footprint SM10B-SRSS-TB(LF)(SN)
pins: 1, 2, 3, 4, 5, 6, 7, 8, 9, 10, MP1, MP2

## SMD PADS (1x4) 2.54mm pitch
designator P?
footprint SMD PADS (1x4) 2.54mm pitch_
pins: 1, 2, 3, 4

## SMDRI127-470MT
designator L?, comment 47uH
2.5A 47uH ±20% SMD Power Inductors ROHS; Manufacturer: SXN(Shun Xiang Nuo Elec); Manufacturer Part Number: SMDRI127-470MT; Package: SMD; LCSC Part Number: C9906; Item Type: Inductor; ComponentLink1Description: LCSC; ComponentLink1URL: https://www.lcsc.com/product-detail/Power-Inductors_SXN-Shun-Xiang-Nuo-Elec-SMDRI127-470MT_C9906.html
footprint SMDRI127-470MT
pins: 1, 2

## SMF5.0CA
designator D?
9.2V 6.4V 5V SOD-123FL TVS ROHS; Manufacturer: GOODWORK; Manufacturer Part Number: SMF5.0CA; Item Type: TVS Diode; Package: SOD-123FL; LCSC Part Number: C2980402; ComponentLink1Description: LCSC; ComponentLink1URL: https://www.lcsc.com/product-detail/TVS_GOODWORK-SMF5-0CA_C2980402.html
footprint SOD-123FL
pins: 1 A, 2 K

## SMF05CT1G-ES
designator U?
15V 5 Unidirectional 5V SOT-363 ESD Protection Devices ROHS; Manufacturer: ElecSuper; Manufacturer Part Number: SMF05CT1G-ES; Item Type: ESD Diode; Package: SOT-363; LCSC Part Number: C5180312; ComponentLink1Description: LCSC; ComponentLink1URL: https://www.lcsc.com/product-detail/ESD-Protection-Devices_ElecSuper-SMF05CT1G-ES_C5180312.html
footprint SOT-363
pins: 1 IO1, 2 A, 3 IO2, 4 IO3, 5 IO4, 6 IO5

## SMI-12VDC-SL-2C
designator K?
12V 5A DPDT (2 Form C) Electromagnetic Relay-Single Coil DIP-8 Power Relays ROHS; Manufacturer: Ningbo Songle Relay; Manufacturer Part Number: SMI-12VDC-SL-2C; Item Type: Relay; Package: DIP-8; LCSC Part Number: C40676; ComponentLink1Description: LCSC; ComponentLink1URL: https://www.lcsc.com/product-detail/Power-Relays_Ningbo-Songle-Relay-SMI-12VDC-SL-2C_C40676.html
footprint DIP-8
pins: 1, 2, 3, 4, 5, 6, 7, 8

## SMRH74-220MT
designator L?, comment 22uH
22uH ±20% SMD Power Inductors ROHS; Manufacturer: SXN(Shun Xiang Nuo Elec); Manufacturer Part Number: SMRH74-220MT; Package: Custom; LCSC Part Number: C27442; Item Type: Inductor; ComponentLink1Description: LCSC; ComponentLink1URL: https://www.lcsc.com/product-detail/Power-Inductors_SXN-Shun-Xiang-Nuo-Elec-SMRH74-220MT_C27442.html
footprint SMRH74-220MT
pins: 1, 2

## SN65HVDA1040AQDRQ1
designator U?
IC TRANSCEIVER HALF 1/1 8SOIC; Manufacturer: Texas Instruments; Manufacturer Part Number: SN65HVDA1040AQDRQ1; Number of Transmit Buffers: 1; Min Supply Voltage: 4.75V; Max Supply Voltage: 5.25V; Data Rate: 1Mbps; Operating Supply Voltage: 5V; Nominal Supply Current: 70mA; Supplier 1: Arrow Electronics; RoHS: Yes; Category: Interface ICs; Stock 1: 20; Pricing 1: 1=1.73580, 10=1.50150 (USD); Case/Package: D; Number of Pins: 8; Contact Plating: Gold; Min Operating Temperature: -40°C; Max Operating Temperature: 125°C; Number of Receive Buffers: 1; Packaging: Tape and Reel; Package Quantity: 2500; Number of Transceivers: 1; Max Supply Current: 70mA; Series: -; Supply Current: 70mA; Radiation Hardening: No; REACH SVHC: No SVHC; Lead Free: Lead Free; RoHS Compliant: Yes; ComponentLink1URL: https://datasheet.ciiva.com/28652/1787993-28652354.pdf?src-supplier=Element14; ComponentLink1Description: https://datasheet.ciiva.com/28652/1787993-28652354.pdf?src-supplier=Element14; ComponentLink2URL: https://datasheet.ciiva.com/41461/001187135-da-01-en-ic-transcv-sn65hvda1040aqdrq1-soic-8-tid-41461891.pdf?src-supplier=Conrad; ComponentLink2Description: https://datasheet.ciiva.com/41461/001187135-da-01-en-ic-transcv-sn65hvda1040aqdrq1-soic-8-tid-41461891.pdf?src-supplier=Conrad; ComponentLink3URL: https://datasheet.ciiva.com/1766/sn65hvda1040a-q1-1766439.pdf?src-supplier=Digi-Key; ComponentLink3Description: https://datasheet.ciiva.com/1766/sn65hvda1040a-q1-1766439.pdf?src-supplier=Digi-Key; ComponentLink4URL: https://datasheet.ciiva.com/1766/sn65hvda1040a-q1-1766438.pdf?src-supplier=Digi-Key; ComponentLink4Description: https://datasheet.ciiva.com/1766/sn65hvda1040a-q1-1766438.pdf?src-supplier=Digi-Key; ComponentLink5URL: https://datasheet.ciiva.com/1766/sn65hvda1040a-q1-1766440.pdf?src-supplier=Digi-Key; ComponentLink5Description: https://datasheet.ciiva.com/1766/sn65hvda1040a-q1-1766440.pdf?src-supplier=Digi-Key; ComponentLink6URL: https://datasheet.ciiva.com/15150/getdatasheetpartid-184324-15150727.pdf?src-supplier=Verical; ComponentLink6Description: https://datasheet.ciiva.com/15150/getdatasheetpartid-184324-15150727.pdf?src-supplier=Verical; Supplier Part Number 1: SN65HVDA1040AQDRQ1; LCSC Part Number: C188675; Item Type: IC
footprint SOIC-8
pins: 1 TXD, 2 GND, 3 VCC, 4 RXD, 5 SPLIT, 6 CANL, 7 CANH, 8 STB